# Altium footprint library WR-MPC3.PcbLib: 235 footprints (part 6 of 15)
Each footprint in its own frame and in the unit in brackets; x right, y up, seen from the top. Pads: shape width x height; smd on the part's side, far side on the other; paste and mask are expansions set on the pad; w line width, h text height; cw(c..) or ccw(c..) is an arc to the next point about the centre after c.
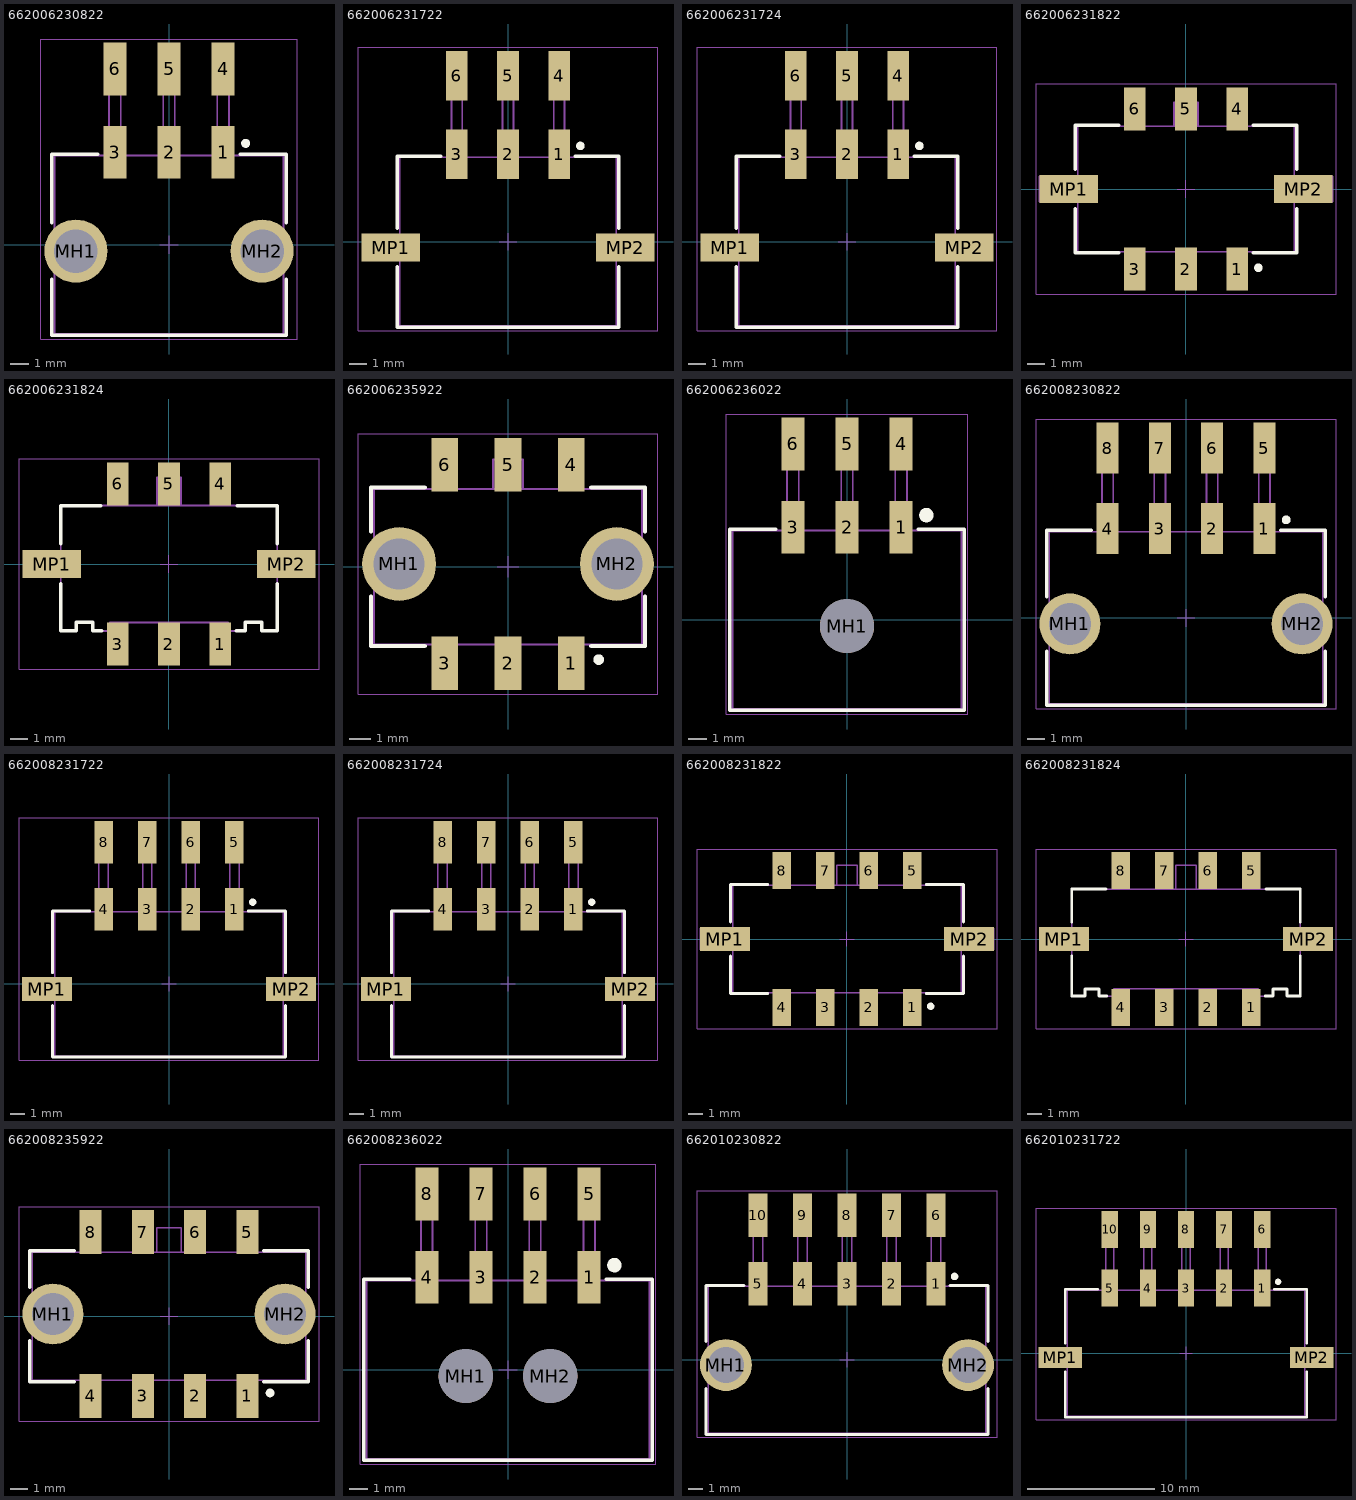
[diagram p5: the footprints below, top view; thin cyan lines are the x and y axes]

## 662006230822 [mm] "Dual row SMT Right angle header With TH Metal Clip 06p"
height 8.76
pads (8):
  rect 1.27x2.92 smd: 1(3,5.13) 2(0,5.13) 3(-3,5.13) 4(3,9.75) 5(0,9.75) 6(-3,9.75)
  round 3.5 hole 2.41: MH1(-5.16,-0.35) MH2(5.16,-0.35)
Top Overlay:
  circle w0.25: c4.25,5.625 r0.125
  lines w0.2: -6.5,-1.925 -6.5,-5.025 6.5,-5.025 6.5,-1.925 ; -6.5,1.225 -6.5,5.025 -3.95,5.025 ; 3.95,5.025 6.5,5.025 6.5,1.225
Top Designator:
  text ".Designator" at -7.498,-0.5 h1.5
Top Component Outline:
  lines w0.1: -3.32,4.95 -3.32,10.95 -2.68,10.95 -2.68,4.95 ; -3.32,6.3 -2.68,6.3 ; -0.32,4.95 -0.32,10.95 0.32,10.95 0.32,4.95 ; -0.32,6.3 0.32,6.3 ; 2.68,4.95 2.68,10.95 3.32,10.95 3.32,4.95 ; 2.68,6.3 3.32,6.3 ; -6.35,-4.95 -6.35,4.95 6.35,4.95 6.35,-4.95 -6.35,-4.95
Top 3D Body:
  lines w0.1: -3.32,4.95 -3.32,10.95 -2.68,10.95 -2.68,4.95 ; -3.32,6.3 -2.68,6.3 ; -0.32,4.95 -0.32,10.95 0.32,10.95 0.32,4.95 ; -0.32,6.3 0.32,6.3 ; 2.68,4.95 2.68,10.95 3.32,10.95 3.32,4.95 ; 2.68,6.3 3.32,6.3 ; -6.35,-4.95 -6.35,4.95 6.35,4.95 6.35,-4.95 -6.35,-4.95
Top Courtyard:
  lines w0.05: -7.11,-5.225 7.11,-5.225 7.11,11.41 -7.11,11.41 -7.11,-5.225
Top Component Center:
  lines w0.05: -0.5,0 0.5,0 ; 0,-0.5 0,0.5
3D body "662006230822.stp": height 8.78, standoff -3.08, extent -6.35,-4.95 6.35,10.95

## 662006231722 [mm] "3.00mm SMT Male Dual Row Angled Header with SMT Solder Tab, 6p"
height 8.26
pads (8):
  rect 1.27x2.92 smd: 1(3,5.13) 2(0,5.13) 3(-3,5.13) 4(3,9.75) 5(0,9.75) 6(-3,9.75)
  rect 3.43x1.65 smd: MP1(-6.895,-0.35) MP2(6.895,-0.35)
Top Overlay:
  circle w0.25: c4.25,5.625 r0.125
  lines w0.2: -6.5,-1.475 -6.5,-5.025 6.5,-5.025 6.5,-1.475 ; -6.5,0.775 -6.5,5.025 -3.95,5.025 ; 3.95,5.025 6.5,5.025 6.5,0.775
Top Designator:
  text ".Designator" at -7.498,-0.5 h1.5
Top Component Outline:
  lines w0.1: -6.35,-1.1 -8.05,-1.1 -8.05,0.4 -6.35,0.4 ; -3.32,4.95 -3.32,10.95 -2.68,10.95 -2.68,4.95 ; -3.32,6.3 -2.68,6.3 ; -0.32,4.95 -0.32,10.95 0.32,10.95 0.32,4.95 ; -0.32,6.3 0.32,6.3 ; 2.68,4.95 2.68,10.95 3.32,10.95 3.32,4.95 ; 2.68,6.3 3.32,6.3 ; 6.35,-1.1 8.05,-1.1 8.05,0.4 6.35,0.4 ; -6.35,-4.95 6.35,-4.95 6.35,4.95 -6.35,4.95 -6.35,-4.95
Top 3D Body:
  lines w0.1: -6.35,-1.1 -8.05,-1.1 -8.05,0.4 -6.35,0.4 ; -3.32,4.95 -3.32,10.95 -2.68,10.95 -2.68,4.95 ; -3.32,6.3 -2.68,6.3 ; -0.32,4.95 -0.32,10.95 0.32,10.95 0.32,4.95 ; -0.32,6.3 0.32,6.3 ; 2.68,4.95 2.68,10.95 3.32,10.95 3.32,4.95 ; 2.68,6.3 3.32,6.3 ; 6.35,-1.1 8.05,-1.1 8.05,0.4 6.35,0.4 ; -6.35,-4.95 -6.35,4.95 6.35,4.95 6.35,-4.95 -6.35,-4.95
Top Courtyard:
  lines w0.05: -8.81,-5.225 -8.81,11.41 8.81,11.41 8.81,-5.225 -8.81,-5.225
Top Component Center:
  lines w0.05: -0.5,0 0.5,0 ; 0,-0.5 0,0.5
3D body "662006231722.stp": height 8.79, standoff 0.03, extent -8.05,-4.95 8.05,10.95

## 662006231724 [mm] "3.00mm SMT Male Dual Row Angled Header with SMT Solder Tab, 6p"
height 8.26
pads (8):
  rect 1.27x2.92 smd: 1(3,5.13) 2(0,5.13) 3(-3,5.13) 4(3,9.75) 5(0,9.75) 6(-3,9.75)
  rect 3.43x1.65 smd: MP1(-6.895,-0.35) MP2(6.895,-0.35)
Top Overlay:
  circle w0.25: c4.25,5.625 r0.125
  lines w0.2: -6.5,-1.475 -6.5,-5.025 6.5,-5.025 6.5,-1.475 ; -6.5,0.775 -6.5,5.025 -3.95,5.025 ; 3.95,5.025 6.5,5.025 6.5,0.775
Top Designator:
  text ".Designator" at -7.498,-0.5 h1.5
Top Component Outline:
  lines w0.1: -6.35,-1.1 -8.05,-1.1 -8.05,0.4 -6.35,0.4 ; -3.32,4.95 -3.32,10.95 -2.68,10.95 -2.68,4.95 ; -3.32,6.3 -2.68,6.3 ; -0.32,4.95 -0.32,10.95 0.32,10.95 0.32,4.95 ; -0.32,6.3 0.32,6.3 ; 2.68,4.95 2.68,10.95 3.32,10.95 3.32,4.95 ; 2.68,6.3 3.32,6.3 ; 6.35,-1.1 8.05,-1.1 8.05,0.4 6.35,0.4 ; -6.35,-4.95 -6.35,4.95 6.35,4.95 6.35,-4.95 -6.35,-4.95
Top 3D Body:
  lines w0.1: -6.35,-1.1 -8.05,-1.1 -8.05,0.4 -6.35,0.4 ; -3.32,4.95 -3.32,10.95 -2.68,10.95 -2.68,4.95 ; -3.32,6.3 -2.68,6.3 ; -0.32,4.95 -0.32,10.95 0.32,10.95 0.32,4.95 ; -0.32,6.3 0.32,6.3 ; 2.68,4.95 2.68,10.95 3.32,10.95 3.32,4.95 ; 2.68,6.3 3.32,6.3 ; 6.35,-1.1 8.05,-1.1 8.05,0.4 6.35,0.4 ; -6.35,-4.95 6.35,-4.95 6.35,4.95 -6.35,4.95 -6.35,-4.95
Top Courtyard:
  lines w0.05: -8.81,-5.225 8.81,-5.225 8.81,11.41 -8.81,11.41 -8.81,-5.225
Top Component Center:
  lines w0.05: -0.5,0 0.5,0 ; 0,-0.5 0,0.5
3D body "662006231724.stp": height 8.76, standoff 0, extent -8.05,-4.95 8.05,10.95

## 662006231822 [mm] "3.00mm SMT Male Dual Row Vertical Header with SMT Solder Tab, 6p"
height 9.9
pads (8):
  rect 1.27x2.54 smd: 1(3,-4.7) 2(0,-4.7) 3(-3,-4.7) 4(3,4.7) 5(0,4.7) 6(-3,4.7)
  rect 3.43x1.65 smd: MP1(-6.895,0) MP2(6.895,0)
Top Overlay:
  circle w0.25: c4.25,-4.625 r0.125
  lines w0.2: -6.5,-1.155 -6.5,-3.755 -3.95,-3.755 ; -6.5,1.155 -6.5,3.755 -3.95,3.755 ; 3.95,-3.755 6.5,-3.755 6.5,-1.155 ; 3.95,3.755 6.5,3.755 6.5,1.155
Top Designator:
  text ".Designator" at -7.498,-0.5 h1.5
Top Component Outline:
  lines w0.1: -6.35,-0.75 -8.6,-0.75 -8.6,0.75 -6.35,0.75 ; -3.32,-3.68 -3.32,-5.698 -2.68,-5.698 -2.68,-3.68 ; -3.32,3.68 -3.32,5.698 -2.68,5.698 -2.68,3.68 ; -0.7,3.68 -0.7,5.08 0.7,5.08 0.7,3.68 ; -0.32,-3.68 -0.32,-5.698 0.32,-5.698 0.32,-3.68 ; -0.32,3.68 -0.32,5.698 0.32,5.698 0.32,3.68 ; 2.68,-3.68 2.68,-5.698 3.32,-5.698 3.32,-3.68 ; 2.68,3.68 2.68,5.698 3.32,5.698 3.32,3.68 ; 6.35,-0.75 8.6,-0.75 8.6,0.75 6.35,0.75 ; -6.35,-3.68 -6.35,3.68 6.35,3.68 6.35,-3.68 -6.35,-3.68
Top 3D Body:
  lines w0.1: -6.35,-0.75 -8.6,-0.75 -8.6,0.75 -6.35,0.75 ; -3.32,-3.68 -3.32,-5.698 -2.68,-5.698 -2.68,-3.68 ; -3.32,3.68 -3.32,5.698 -2.68,5.698 -2.68,3.68 ; -0.7,3.68 -0.7,5.08 0.7,5.08 0.7,3.68 ; -0.32,-3.68 -0.32,-5.698 0.32,-5.698 0.32,-3.68 ; -0.32,3.68 -0.32,5.698 0.32,5.698 0.32,3.68 ; 2.68,-3.68 2.68,-5.698 3.32,-5.698 3.32,-3.68 ; 2.68,3.68 2.68,5.698 3.32,5.698 3.32,3.68 ; 6.35,-0.75 8.6,-0.75 8.6,0.75 6.35,0.75 ; -6.35,-3.68 6.35,-3.68 6.35,3.68 -6.35,3.68 -6.35,-3.68
Top Courtyard:
  lines w0.05: -8.81,-6.17 -8.81,6.17 8.81,6.17 8.81,-6.17 -8.81,-6.17
Top Component Center:
  lines w0.05: -0.5,0 0.5,0 ; 0,-0.5 0,0.5
3D body "662006231822.stp": height 9.93, standoff 0.03, extent -8.6,-5.698 8.6,5.698

## 662006231824 [mm] "3.00mm SMT Male Dual Row Vertical Header with SMT Solder Tab, 6p"
height 9.9
pads (8):
  rect 1.27x2.54 smd: 1(3,-4.7) 2(0,-4.7) 3(-3,-4.7) 4(3,4.7) 5(0,4.7) 6(-3,4.7)
  rect 3.43x1.65 smd: MP1(-6.895,0) MP2(6.895,0)
Top Overlay:
  lines w0.2: -6.35,-1.17 -6.35,-3.93 -5.45,-3.93 -5.45,-3.43 -4.48,-3.43 -4.48,-3.93 -3.95,-3.93 ; -6.35,1.18 -6.35,3.43 -4.003,3.43 ; 3.95,-3.93 4.48,-3.93 4.48,-3.43 5.45,-3.43 5.45,-3.93 6.35,-3.93 6.35,-1.17 ; 4.003,3.43 6.35,3.43 6.35,1.18
Top Designator:
  text ".Designator" at -7.498,-0.5 h1.5
Top Component Outline:
  lines w0.1: -6.35,-0.75 -8.05,-0.75 -8.05,0.75 -6.35,0.75 ; -3.32,-3.43 -3.32,-5.698 -2.68,-5.698 -2.68,-3.43 ; -3.32,3.43 -3.32,5.698 -2.68,5.698 -2.68,3.43 ; -0.7,3.43 -0.7,5.08 0.7,5.08 0.7,3.43 ; -0.32,-3.43 -0.32,-5.698 0.32,-5.698 0.32,-3.43 ; -0.32,3.43 -0.32,5.698 0.32,5.698 0.32,3.43 ; 2.68,-3.43 2.68,-5.698 3.32,-5.698 3.32,-3.43 ; 2.68,3.43 2.68,5.698 3.32,5.698 3.32,3.43 ; 6.35,-0.75 8.05,-0.75 8.05,0.75 6.35,0.75 ; -6.35,-3.93 -6.35,3.43 6.35,3.43 6.35,-3.93 5.45,-3.93 5.45,-3.43 4.48,-3.43 4.48,-3.93 3.48,-3.93 3.48,-3.43 -3.48,-3.43 -3.48,-3.93 -4.48,-3.93 -4.48,-3.43 -5.45,-3.43 -5.45,-3.93 -6.35,-3.93
Top Courtyard:
  lines w0.05: -8.81,-6.17 8.81,-6.17 8.81,6.17 -8.81,6.17 -8.81,-6.17
Top Component Center:
  lines w0.05: -0.5,0 0.5,0 ; 0,-0.5 0,0.5
3D body "662006231824.stp": height 9.93, standoff 0.03, extent -8.045,-5.698 8.045,5.698

## 662006235922 [mm] "Dual row SMT Vertical header With TH metal clip 06p"
height 9.9
pads (8):
  rect 1.27x2.54 smd: 1(3,-4.57) 2(0,-4.57) 3(-3,-4.57) 4(3,4.83) 5(0,4.83) 6(-3,4.83)
  round 3.5 hole 2.41: MH1(-5.16,0.13) MH2(5.16,0.13)
Top Overlay:
  circle w0.25: c4.3,-4.4 r0.125
  lines w0.2: -6.5,-1.405 -6.5,-3.755 -3.95,-3.755 ; -6.5,1.665 -6.5,3.755 -3.95,3.755 ; 3.95,-3.755 6.5,-3.755 6.5,-1.405 ; 3.95,3.755 6.5,3.755 6.5,1.665
Top Designator:
  text ".Designator" at -7.498,-0.5 h1.5
Top Component Outline:
  lines w0.1: -3.32,-3.68 -3.32,-5.5 -2.68,-5.5 -2.68,-3.68 ; -3.32,3.68 -3.32,5.9 -2.68,5.9 -2.68,3.68 ; -0.7,3.68 -0.7,5.08 0.7,5.08 0.7,3.68 ; -0.32,-3.68 -0.32,-5.5 0.32,-5.5 0.32,-3.68 ; -0.32,3.68 -0.32,5.9 0.32,5.9 0.32,3.68 ; 2.68,-3.68 2.68,-5.5 3.32,-5.5 3.32,-3.68 ; 2.68,3.68 2.68,5.9 3.32,5.9 3.32,3.68 ; -6.35,-3.68 -6.35,3.68 6.35,3.68 6.35,-3.68 -6.35,-3.68
Top 3D Body:
  lines w0.1: -3.32,-3.68 -3.32,-5.5 -2.68,-5.5 -2.68,-3.68 ; -3.32,3.68 -3.32,5.9 -2.68,5.9 -2.68,3.68 ; -0.7,3.68 -0.7,5.08 0.7,5.08 0.7,3.68 ; -0.32,-3.68 -0.32,-5.5 0.32,-5.5 0.32,-3.68 ; -0.32,3.68 -0.32,5.9 0.32,5.9 0.32,3.68 ; 2.68,-3.68 2.68,-5.5 3.32,-5.5 3.32,-3.68 ; 2.68,3.68 2.68,5.9 3.32,5.9 3.32,3.68 ; -6.35,-3.68 6.35,-3.68 6.35,3.68 -6.35,3.68 -6.35,-3.68
Top Courtyard:
  lines w0.05: -7.11,-6.04 7.11,-6.04 7.11,6.3 -7.11,6.3 -7.11,-6.04
Top Component Center:
  lines w0.05: -0.5,0 0.5,0 ; 0,-0.5 0,0.5
3D body "662006235922.stp": height 9.92, standoff -3.08, extent -6.35,-5.5 6.35,5.9

## 662006236022 [mm] "3.00mm SMT Male Dual Row Angled Header with Plastic Pegs, 6p"
height 8.26
pads (7):
  rect 1.27x2.92 smd: 1(3,5.13) 2(0,5.13) 3(-3,5.13) 4(3,9.75) 5(0,9.75) 6(-3,9.75)
  round 3 hole 3 unplated: MH1(0,-0.35)
Top Overlay:
  circle w0.4: c4.4,5.8 r0.2
  lines w0.2: -3.95,5.025 -6.5,5.025 -6.5,-5.025 6.5,-5.025 6.5,5.025 3.95,5.025
Top Designator:
  text ".Designator" at -7.498,-0.5 h1.5
Top Component Outline:
  lines w0.1: -3.32,4.95 -3.32,10.95 -2.68,10.95 -2.68,4.95 ; -3.32,6.3 -2.68,6.3 ; -0.32,4.95 -0.32,10.95 0.32,10.95 0.32,4.95 ; -0.32,6.3 0.32,6.3 ; 2.68,4.95 2.68,10.95 3.32,10.95 3.32,4.95 ; 2.68,6.3 3.32,6.3 ; -6.35,-4.95 -6.35,4.95 6.35,4.95 6.35,-4.95 -6.35,-4.95
Top 3D Body:
  lines w0.1: -3.32,4.95 -3.32,10.95 -2.68,10.95 -2.68,4.95 ; -3.32,6.3 -2.68,6.3 ; -0.32,4.95 -0.32,10.95 0.32,10.95 0.32,4.95 ; -0.32,6.3 0.32,6.3 ; 2.68,4.95 2.68,10.95 3.32,10.95 3.32,4.95 ; 2.68,6.3 3.32,6.3 ; -6.35,-4.95 6.35,-4.95 6.35,4.95 -6.35,4.95 -6.35,-4.95
Top Courtyard:
  lines w0.05: -6.7,-5.225 6.7,-5.225 6.7,11.41 -6.7,11.41 -6.7,-5.225
Top Component Center:
  lines w0.05: -0.5,0 0.5,0 ; 0,-0.5 0,0.5
3D body "662006236022.stp": height 8.79, standoff -3.17, extent -6.35,-4.95 6.35,10.95

## 662008230822 [mm] "Dual row SMT Right angle header With TH Metal Clip 08p"
height 8.76
pads (10):
  rect 1.27x2.92 smd: 1(4.5,5.13) 2(1.5,5.13) 3(-1.5,5.13) 4(-4.5,5.13) 5(4.5,9.75) 6(1.5,9.75) 7(-1.5,9.75) 8(-4.5,9.75)
  round 3.5 hole 2.41: MH1(-6.66,-0.35) MH2(6.66,-0.35)
Top Overlay:
  circle w0.25: c5.75,5.625 r0.125
  lines w0.2: -8,-1.925 -8,-5.025 8,-5.025 8,-1.925 ; -8,1.225 -8,5.025 -5.45,5.025 ; 5.45,5.025 8,5.025 8,1.225
Top Designator:
  text ".Designator" at -7.498,-0.5 h1.5
Top Component Outline:
  lines w0.1: -4.82,4.95 -4.82,10.95 -4.18,10.95 -4.18,4.95 ; -4.82,6.3 -4.18,6.3 ; -1.82,4.95 -1.82,10.95 -1.18,10.95 -1.18,4.95 ; -1.82,6.3 -1.18,6.3 ; 1.18,4.95 1.18,10.95 1.82,10.95 1.82,4.95 ; 1.18,6.3 1.82,6.3 ; 4.18,4.95 4.18,10.95 4.82,10.95 4.82,4.95 ; 4.18,6.3 4.82,6.3 ; -7.85,-4.95 7.85,-4.95 7.85,4.95 -7.85,4.95 -7.85,-4.95
Top 3D Body:
  lines w0.1: -4.82,4.95 -4.82,10.95 -4.18,10.95 -4.18,4.95 ; -4.82,6.3 -4.18,6.3 ; -1.82,4.95 -1.82,10.95 -1.18,10.95 -1.18,4.95 ; -1.82,6.3 -1.18,6.3 ; 1.18,4.95 1.18,10.95 1.82,10.95 1.82,4.95 ; 1.18,6.3 1.82,6.3 ; 4.18,4.95 4.18,10.95 4.82,10.95 4.82,4.95 ; 4.18,6.3 4.82,6.3 ; -7.85,-4.95 -7.85,4.95 7.85,4.95 7.85,-4.95 -7.85,-4.95
Top Courtyard:
  lines w0.05: -8.61,-5.225 8.61,-5.225 8.61,11.41 -8.61,11.41 -8.61,-5.225
Top Component Center:
  lines w0.05: -0.5,0 0.5,0 ; 0,-0.5 0,0.5
3D body "662008230822.stp": height 8.78, standoff -3.08, extent -7.85,-4.95 7.85,10.95

## 662008231722 [mm] "3.00mm SMT Male Dual Row Angled Header with SMT Solder Tab, 8p"
height 8.26
pads (10):
  rect 1.27x2.92 smd: 1(4.5,5.13) 2(1.5,5.13) 3(-1.5,5.13) 4(-4.5,5.13) 5(4.5,9.75) 6(1.5,9.75) 7(-1.5,9.75) 8(-4.5,9.75)
  rect 3.43x1.65 smd: MP1(-8.395,-0.35) MP2(8.395,-0.35)
Top Overlay:
  circle w0.25: c5.75,5.625 r0.125
  lines w0.2: -8,-1.475 -8,-5.025 8,-5.025 8,-1.475 ; -8,0.775 -8,5.025 -5.45,5.025 ; 5.45,5.025 8,5.025 8,0.775
Top Designator:
  text ".Designator" at -7.498,-0.5 h1.5
Top Component Outline:
  lines w0.1: -7.85,-1.1 -9.55,-1.1 -9.55,0.4 -7.85,0.4 ; -4.82,4.95 -4.82,10.95 -4.18,10.95 -4.18,4.95 ; -4.82,6.3 -4.18,6.3 ; -1.82,4.95 -1.82,10.95 -1.18,10.95 -1.18,4.95 ; -1.82,6.3 -1.18,6.3 ; 1.18,4.95 1.18,10.95 1.82,10.95 1.82,4.95 ; 1.18,6.3 1.82,6.3 ; 4.18,4.95 4.18,10.95 4.82,10.95 4.82,4.95 ; 4.18,6.3 4.82,6.3 ; 7.85,-1.1 9.55,-1.1 9.55,0.4 7.85,0.4 ; -7.85,-4.95 7.85,-4.95 7.85,4.95 -7.85,4.95 -7.85,-4.95
Top 3D Body:
  lines w0.1: -7.85,-1.1 -9.55,-1.1 -9.55,0.4 -7.85,0.4 ; -4.82,4.95 -4.82,10.95 -4.18,10.95 -4.18,4.95 ; -4.82,6.3 -4.18,6.3 ; -1.82,4.95 -1.82,10.95 -1.18,10.95 -1.18,4.95 ; -1.82,6.3 -1.18,6.3 ; 1.18,4.95 1.18,10.95 1.82,10.95 1.82,4.95 ; 1.18,6.3 1.82,6.3 ; 4.18,4.95 4.18,10.95 4.82,10.95 4.82,4.95 ; 4.18,6.3 4.82,6.3 ; 7.85,-1.1 9.55,-1.1 9.55,0.4 7.85,0.4 ; -7.85,-4.95 -7.85,4.95 7.85,4.95 7.85,-4.95 -7.85,-4.95
Top Courtyard:
  lines w0.05: -10.31,-5.225 -10.31,11.41 10.31,11.41 10.31,-5.225 -10.31,-5.225
Top Component Center:
  lines w0.05: -0.5,0 0.5,0 ; 0,-0.5 0,0.5
3D body "662008231722.stp": height 8.79, standoff 0.03, extent -9.55,-4.95 9.55,10.95

## 662008231724 [mm] "3.00mm SMT Male Dual Row Angled Header with SMT Solder Tab, 8p"
height 8.26
pads (10):
  rect 1.27x2.92 smd: 1(4.5,5.13) 2(1.5,5.13) 3(-1.5,5.13) 4(-4.5,5.13) 5(4.5,9.75) 6(1.5,9.75) 7(-1.5,9.75) 8(-4.5,9.75)
  rect 3.43x1.65 smd: MP1(-8.395,-0.35) MP2(8.395,-0.35)
Top Overlay:
  circle w0.25: c5.75,5.625 r0.125
  lines w0.2: -8,-1.475 -8,-5.025 8,-5.025 8,-1.475 ; -8,0.775 -8,5.025 -5.45,5.025 ; 5.45,5.025 8,5.025 8,0.775
Top Designator:
  text ".Designator" at -7.498,-0.5 h1.5
Top Component Outline:
  lines w0.1: -7.85,-1.1 -9.55,-1.1 -9.55,0.4 -7.85,0.4 ; -4.82,4.95 -4.82,10.95 -4.18,10.95 -4.18,4.95 ; -4.82,6.3 -4.18,6.3 ; -1.82,4.95 -1.82,10.95 -1.18,10.95 -1.18,4.95 ; -1.82,6.3 -1.18,6.3 ; 1.18,4.95 1.18,10.95 1.82,10.95 1.82,4.95 ; 1.18,6.3 1.82,6.3 ; 4.18,4.95 4.18,10.95 4.82,10.95 4.82,4.95 ; 4.18,6.3 4.82,6.3 ; 7.85,-1.1 9.55,-1.1 9.55,0.4 7.85,0.4 ; -7.85,-4.95 7.85,-4.95 7.85,4.95 -7.85,4.95 -7.85,-4.95
Top 3D Body:
  lines w0.1: -7.85,-1.1 -9.55,-1.1 -9.55,0.4 -7.85,0.4 ; -4.82,4.95 -4.82,10.95 -4.18,10.95 -4.18,4.95 ; -4.82,6.3 -4.18,6.3 ; -1.82,4.95 -1.82,10.95 -1.18,10.95 -1.18,4.95 ; -1.82,6.3 -1.18,6.3 ; 1.18,4.95 1.18,10.95 1.82,10.95 1.82,4.95 ; 1.18,6.3 1.82,6.3 ; 4.18,4.95 4.18,10.95 4.82,10.95 4.82,4.95 ; 4.18,6.3 4.82,6.3 ; 7.85,-1.1 9.55,-1.1 9.55,0.4 7.85,0.4 ; -7.85,-4.95 -7.85,4.95 7.85,4.95 7.85,-4.95 -7.85,-4.95
Top Courtyard:
  lines w0.05: -10.31,-5.225 -10.31,11.41 10.31,11.41 10.31,-5.225 -10.31,-5.225
Top Component Center:
  lines w0.05: -0.5,0 0.5,0 ; 0,-0.5 0,0.5
3D body "662008231724.stp": height 8.76, standoff 0, extent -9.55,-4.95 9.55,10.95

## 662008231822 [mm] "3.00mm SMT Male Dual Row Vertical Header with SMT Solder Tab, 8p"
height 9.9
pads (10):
  rect 1.27x2.54 smd: 1(4.5,-4.7) 2(1.5,-4.7) 3(-1.5,-4.7) 4(-4.5,-4.7) 5(4.5,4.7) 6(1.5,4.7) 7(-1.5,4.7) 8(-4.5,4.7)
  rect 3.43x1.65 smd: MP1(-8.395,0) MP2(8.395,0)
Top Overlay:
  circle w0.25: c5.75,-4.625 r0.125
  lines w0.2: -8,-1.155 -8,-3.755 -5.45,-3.755 ; -8,1.155 -8,3.755 -5.45,3.755 ; 5.45,-3.755 8,-3.755 8,-1.155 ; 5.45,3.755 8,3.755 8,1.155
Top Designator:
  text ".Designator" at -7.498,-0.5 h1.5
Top Component Outline:
  lines w0.1: -7.85,-0.75 -10.1,-0.75 -10.1,0.75 -7.85,0.75 ; -4.82,-3.68 -4.82,-5.698 -4.18,-5.698 -4.18,-3.68 ; -4.82,3.68 -4.82,5.698 -4.18,5.698 -4.18,3.68 ; -1.82,-3.68 -1.82,-5.698 -1.18,-5.698 -1.18,-3.68 ; -1.82,3.68 -1.82,5.698 -1.18,5.698 -1.18,3.68 ; -0.7,3.68 -0.7,5.08 0.7,5.08 0.7,3.68 ; 1.18,-3.68 1.18,-5.698 1.82,-5.698 1.82,-3.68 ; 1.18,3.68 1.18,5.698 1.82,5.698 1.82,3.68 ; 4.18,-3.68 4.18,-5.698 4.82,-5.698 4.82,-3.68 ; 4.18,3.68 4.18,5.698 4.82,5.698 4.82,3.68 ; 7.85,-0.75 10.1,-0.75 10.1,0.75 7.85,0.75 ; -7.85,-3.68 7.85,-3.68 7.85,3.68 -7.85,3.68 -7.85,-3.68
Top 3D Body:
  lines w0.1: -7.85,-0.75 -10.1,-0.75 -10.1,0.75 -7.85,0.75 ; -4.82,-3.68 -4.82,-5.698 -4.18,-5.698 -4.18,-3.68 ; -4.82,3.68 -4.82,5.698 -4.18,5.698 -4.18,3.68 ; -1.82,-3.68 -1.82,-5.698 -1.18,-5.698 -1.18,-3.68 ; -1.82,3.68 -1.82,5.698 -1.18,5.698 -1.18,3.68 ; -0.7,3.68 -0.7,5.08 0.7,5.08 0.7,3.68 ; 1.18,-3.68 1.18,-5.698 1.82,-5.698 1.82,-3.68 ; 1.18,3.68 1.18,5.698 1.82,5.698 1.82,3.68 ; 4.18,-3.68 4.18,-5.698 4.82,-5.698 4.82,-3.68 ; 4.18,3.68 4.18,5.698 4.82,5.698 4.82,3.68 ; 7.85,-0.75 10.1,-0.75 10.1,0.75 7.85,0.75 ; -7.85,-3.68 7.85,-3.68 7.85,3.68 -7.85,3.68 -7.85,-3.68
Top Courtyard:
  lines w0.05: -10.31,-6.17 -10.31,6.17 10.31,6.17 10.31,-6.17 -10.31,-6.17
Top Component Center:
  lines w0.05: -0.5,0 0.5,0 ; 0,-0.5 0,0.5
3D body "662008231822.stp": height 9.93, standoff 0.03, extent -10.1,-5.698 10.1,5.698

## 662008231824 [mm] "3.00mm SMT Male Dual Row Vertical Header with SMT Solder Tab, 8p"
height 9.9
pads (10):
  rect 1.27x2.54 smd: 1(4.5,-4.7) 2(1.5,-4.7) 3(-1.5,-4.7) 4(-4.5,-4.7) 5(4.5,4.7) 6(1.5,4.7) 7(-1.5,4.7) 8(-4.5,4.7)
  rect 3.43x1.65 smd: MP1(-8.395,0) MP2(8.395,0)
Top Overlay:
  lines w0.2: -7.85,-1.17 -7.85,-3.93 -6.95,-3.93 -6.95,-3.43 -5.98,-3.43 -5.98,-3.93 -5.45,-3.93 ; -7.85,1.18 -7.85,3.43 -5.503,3.43 ; 5.45,-3.93 5.98,-3.93 5.98,-3.43 6.95,-3.43 6.95,-3.93 7.85,-3.93 7.85,-1.17 ; 5.503,3.43 7.85,3.43 7.85,1.18
Top Designator:
  text ".Designator" at -7.498,-0.5 h1.5
Top Component Outline:
  lines w0.1: -7.85,-0.75 -9.55,-0.75 -9.55,0.75 -7.85,0.75 ; -4.82,-3.43 -4.82,-5.698 -4.18,-5.698 -4.18,-3.43 ; -4.82,3.43 -4.82,5.698 -4.18,5.698 -4.18,3.43 ; -1.82,-3.43 -1.82,-5.698 -1.18,-5.698 -1.18,-3.43 ; -1.82,3.43 -1.82,5.698 -1.18,5.698 -1.18,3.43 ; -0.7,3.43 -0.7,5.08 0.7,5.08 0.7,3.43 ; 1.18,-3.43 1.18,-5.698 1.82,-5.698 1.82,-3.43 ; 1.18,3.43 1.18,5.698 1.82,5.698 1.82,3.43 ; 4.18,-3.43 4.18,-5.698 4.82,-5.698 4.82,-3.43 ; 4.18,3.43 4.18,5.698 4.82,5.698 4.82,3.43 ; 7.85,-0.75 9.55,-0.75 9.55,0.75 7.85,0.75 ; -7.85,-3.93 -6.95,-3.93 -6.95,-3.43 -5.98,-3.43 -5.98,-3.93 -4.98,-3.93 -4.98,-3.43 4.98,-3.43 4.98,-3.93 5.98,-3.93 5.98,-3.43 6.95,-3.43 6.95,-3.93 7.85,-3.93 7.85,3.43 -7.85,3.43 -7.85,-3.93
Top Courtyard:
  lines w0.05: -10.31,-6.17 10.31,-6.17 10.31,6.17 -10.31,6.17 -10.31,-6.17
Top Component Center:
  lines w0.05: -0.5,0 0.5,0 ; 0,-0.5 0,0.5
3D body "662008231824.stp": height 9.93, standoff 0.03, extent -9.545,-5.698 9.545,5.698

## 662008235922 [mm] "Dual row SMT Vertical header With TH metal clip 08p"
height 9.9
pads (10):
  rect 1.27x2.54 smd: 1(4.5,-4.57) 2(1.5,-4.57) 3(-1.5,-4.57) 4(-4.5,-4.57) 5(4.5,4.83) 6(1.5,4.83) 7(-1.5,4.83) 8(-4.5,4.83)
  round 3.5 hole 2.41: MH1(-6.66,0.13) MH2(6.66,0.13)
Top Overlay:
  circle w0.25: c5.8,-4.4 r0.125
  lines w0.2: -8,-1.405 -8,-3.755 -5.45,-3.755 ; -8,1.665 -8,3.755 -5.45,3.755 ; 5.45,-3.755 8,-3.755 8,-1.405 ; 5.45,3.755 8,3.755 8,1.665
Top Designator:
  text ".Designator" at -7.498,-0.5 h1.5
Top Component Outline:
  lines w0.1: -4.82,-3.68 -4.82,-5.5 -4.18,-5.5 -4.18,-3.68 ; -4.82,3.68 -4.82,5.9 -4.18,5.9 -4.18,3.68 ; -1.82,-3.68 -1.82,-5.5 -1.18,-5.5 -1.18,-3.68 ; -1.82,3.68 -1.82,5.9 -1.18,5.9 -1.18,3.68 ; -0.7,3.68 -0.7,5.08 0.7,5.08 0.7,3.68 ; 1.18,-3.68 1.18,-5.5 1.82,-5.5 1.82,-3.68 ; 1.18,3.68 1.18,5.9 1.82,5.9 1.82,3.68 ; 4.18,-3.68 4.18,-5.5 4.82,-5.5 4.82,-3.68 ; 4.18,3.68 4.18,5.9 4.82,5.9 4.82,3.68 ; -7.85,-3.68 -7.85,3.68 7.85,3.68 7.85,-3.68 -7.85,-3.68
Top 3D Body:
  lines w0.1: -4.82,-3.68 -4.82,-5.5 -4.18,-5.5 -4.18,-3.68 ; -4.82,3.68 -4.82,5.9 -4.18,5.9 -4.18,3.68 ; -1.82,-3.68 -1.82,-5.5 -1.18,-5.5 -1.18,-3.68 ; -1.82,3.68 -1.82,5.9 -1.18,5.9 -1.18,3.68 ; -0.7,3.68 -0.7,5.08 0.7,5.08 0.7,3.68 ; 1.18,-3.68 1.18,-5.5 1.82,-5.5 1.82,-3.68 ; 1.18,3.68 1.18,5.9 1.82,5.9 1.82,3.68 ; 4.18,-3.68 4.18,-5.5 4.82,-5.5 4.82,-3.68 ; 4.18,3.68 4.18,5.9 4.82,5.9 4.82,3.68 ; -7.85,-3.68 -7.85,3.68 7.85,3.68 7.85,-3.68 -7.85,-3.68
Top Courtyard:
  lines w0.05: -8.61,-6.04 -8.61,6.3 8.61,6.3 8.61,-6.04 -8.61,-6.04
Top Component Center:
  lines w0.05: -0.5,0 0.5,0 ; 0,-0.5 0,0.5
3D body "662008235922.stp": height 9.92, standoff -3.08, extent -7.85,-5.5 7.85,5.9

## 662008236022 [mm] "3.00mm SMT Male Dual Row Angled Header with Plastic Pegs, 8p"
height 8.26
pads (10):
  rect 1.27x2.92 smd: 1(4.5,5.13) 2(1.5,5.13) 3(-1.5,5.13) 4(-4.5,5.13) 5(4.5,9.75) 6(1.5,9.75) 7(-1.5,9.75) 8(-4.5,9.75)
  round 3 hole 3 unplated: MH1(-2.34,-0.35) MH2(2.34,-0.35)
Top Overlay:
  circle w0.4: c5.9,5.8 r0.2
  lines w0.2: -5.45,5.025 -8,5.025 -8,-5.025 8,-5.025 8,5.025 5.45,5.025
Top Designator:
  text ".Designator" at -7.498,-0.5 h1.5
Top Component Outline:
  lines w0.1: -4.82,4.95 -4.82,10.95 -4.18,10.95 -4.18,4.95 ; -4.82,6.3 -4.18,6.3 ; -1.82,4.95 -1.82,10.95 -1.18,10.95 -1.18,4.95 ; -1.82,6.3 -1.18,6.3 ; 1.18,4.95 1.18,10.95 1.82,10.95 1.82,4.95 ; 1.18,6.3 1.82,6.3 ; 4.18,4.95 4.18,10.95 4.82,10.95 4.82,4.95 ; 4.18,6.3 4.82,6.3 ; -7.85,-4.95 7.85,-4.95 7.85,4.95 -7.85,4.95 -7.85,-4.95
Top 3D Body:
  lines w0.1: -4.82,4.95 -4.82,10.95 -4.18,10.95 -4.18,4.95 ; -4.82,6.3 -4.18,6.3 ; -1.82,4.95 -1.82,10.95 -1.18,10.95 -1.18,4.95 ; -1.82,6.3 -1.18,6.3 ; 1.18,4.95 1.18,10.95 1.82,10.95 1.82,4.95 ; 1.18,6.3 1.82,6.3 ; 4.18,4.95 4.18,10.95 4.82,10.95 4.82,4.95 ; 4.18,6.3 4.82,6.3 ; -7.85,-4.95 7.85,-4.95 7.85,4.95 -7.85,4.95 -7.85,-4.95
Top Courtyard:
  lines w0.05: -8.2,-5.225 8.2,-5.225 8.2,11.41 -8.2,11.41 -8.2,-5.225
Top Component Center:
  lines w0.05: -0.5,0 0.5,0 ; 0,-0.5 0,0.5
3D body "662008236022.stp": height 8.79, standoff -3.17, extent -7.85,-4.95 7.85,10.95

## 662010230822 [mm] "Dual row SMT Right angle header With TH Metal Clip 10p"
height 8.76
pads (12):
  rect 1.27x2.92 smd: 1(6,5.13) 2(3,5.13) 3(0,5.13) 4(-3,5.13) 5(-6,5.13) 6(6,9.75) 7(3,9.75) 8(0,9.75) 9(-3,9.75) 10(-6,9.75)
  round 3.5 hole 2.41: MH1(-8.16,-0.35) MH2(8.16,-0.35)
Top Overlay:
  circle w0.25: c7.25,5.625 r0.125
  lines w0.2: -9.5,-1.925 -9.5,-5.025 9.5,-5.025 9.5,-1.925 ; -9.5,1.225 -9.5,5.025 -6.95,5.025 ; 6.95,5.025 9.5,5.025 9.5,1.225
Top Designator:
  text ".Designator" at -7.498,-0.5 h1.5
Top Component Outline:
  lines w0.1: -6.32,4.95 -6.32,10.95 -5.68,10.95 -5.68,4.95 ; -6.32,6.3 -5.68,6.3 ; -3.32,4.95 -3.32,10.95 -2.68,10.95 -2.68,4.95 ; -3.32,6.3 -2.68,6.3 ; -0.32,4.95 -0.32,10.95 0.32,10.95 0.32,4.95 ; -0.32,6.3 0.32,6.3 ; 2.68,4.95 2.68,10.95 3.32,10.95 3.32,4.95 ; 2.68,6.3 3.32,6.3 ; 5.68,4.95 5.68,10.95 6.32,10.95 6.32,4.95 ; 5.68,6.3 6.32,6.3 ; -9.35,-4.95 -9.35,4.95 9.35,4.95 9.35,-4.95 -9.35,-4.95
Top 3D Body:
  lines w0.1: -6.32,4.95 -6.32,10.95 -5.68,10.95 -5.68,4.95 ; -6.32,6.3 -5.68,6.3 ; -3.32,4.95 -3.32,10.95 -2.68,10.95 -2.68,4.95 ; -3.32,6.3 -2.68,6.3 ; -0.32,4.95 -0.32,10.95 0.32,10.95 0.32,4.95 ; -0.32,6.3 0.32,6.3 ; 2.68,4.95 2.68,10.95 3.32,10.95 3.32,4.95 ; 2.68,6.3 3.32,6.3 ; 5.68,4.95 5.68,10.95 6.32,10.95 6.32,4.95 ; 5.68,6.3 6.32,6.3 ; -9.35,-4.95 9.35,-4.95 9.35,4.95 -9.35,4.95 -9.35,-4.95
Top Courtyard:
  lines w0.05: -10.11,-5.225 -10.11,11.41 10.11,11.41 10.11,-5.225 -10.11,-5.225
Top Component Center:
  lines w0.05: -0.5,0 0.5,0 ; 0,-0.5 0,0.5
3D body "662010230822.stp": height 8.78, standoff -3.08, extent -9.35,-4.95 9.35,10.95

## 662010231722 [mm] "3.00mm SMT Male Dual Row Angled Header with SMT Solder Tab, 10p"
height 8.26
pads (12):
  rect 1.27x2.92 smd: 1(6,5.13) 2(3,5.13) 3(0,5.13) 4(-3,5.13) 5(-6,5.13) 6(6,9.75) 7(3,9.75) 8(0,9.75) 9(-3,9.75) 10(-6,9.75)
  rect 3.43x1.65 smd: MP1(-9.895,-0.35) MP2(9.895,-0.35)
Top Overlay:
  circle w0.25: c7.25,5.625 r0.125
  lines w0.2: -9.5,-1.475 -9.5,-5.025 9.5,-5.025 9.5,-1.475 ; -9.5,0.775 -9.5,5.025 -6.95,5.025 ; 6.95,5.025 9.5,5.025 9.5,0.775
Top Designator:
  text ".Designator" at -7.498,-0.5 h1.5
Top Component Outline:
  lines w0.1: -9.35,-1.1 -11.05,-1.1 -11.05,0.4 -9.35,0.4 ; -6.32,4.95 -6.32,10.95 -5.68,10.95 -5.68,4.95 ; -6.32,6.3 -5.68,6.3 ; -3.32,4.95 -3.32,10.95 -2.68,10.95 -2.68,4.95 ; -3.32,6.3 -2.68,6.3 ; -0.32,4.95 -0.32,10.95 0.32,10.95 0.32,4.95 ; -0.32,6.3 0.32,6.3 ; 2.68,4.95 2.68,10.95 3.32,10.95 3.32,4.95 ; 2.68,6.3 3.32,6.3 ; 5.68,4.95 5.68,10.95 6.32,10.95 6.32,4.95 ; 5.68,6.3 6.32,6.3 ; 9.35,-1.1 11.05,-1.1 11.05,0.4 9.35,0.4 ; -9.35,-4.95 9.35,-4.95 9.35,4.95 -9.35,4.95 -9.35,-4.95
Top 3D Body:
  lines w0.1: -9.35,-1.1 -11.05,-1.1 -11.05,0.4 -9.35,0.4 ; -6.32,4.95 -6.32,10.95 -5.68,10.95 -5.68,4.95 ; -6.32,6.3 -5.68,6.3 ; -3.32,4.95 -3.32,10.95 -2.68,10.95 -2.68,4.95 ; -3.32,6.3 -2.68,6.3 ; -0.32,4.95 -0.32,10.95 0.32,10.95 0.32,4.95 ; -0.32,6.3 0.32,6.3 ; 2.68,4.95 2.68,10.95 3.32,10.95 3.32,4.95 ; 2.68,6.3 3.32,6.3 ; 5.68,4.95 5.68,10.95 6.32,10.95 6.32,4.95 ; 5.68,6.3 6.32,6.3 ; 9.35,-1.1 11.05,-1.1 11.05,0.4 9.35,0.4 ; -9.35,-4.95 -9.35,4.95 9.35,4.95 9.35,-4.95 -9.35,-4.95
Top Courtyard:
  lines w0.05: -11.81,-5.225 -11.81,11.41 11.81,11.41 11.81,-5.225 -11.81,-5.225
Top Component Center:
  lines w0.05: -0.5,0 0.5,0 ; 0,-0.5 0,0.5
3D body "662010231722.stp": height 8.79, standoff 0.03, extent -11.05,-4.95 11.05,10.95